# Altium footprint library 固定柱.PcbLib: 140 footprints (part 4 of 9)
Each footprint in its own frame and in the unit in brackets; x right, y up, seen from the top. Pads: shape width x height; smd on the part's side, far side on the other; paste and mask are expansions set on the pad; w line width, h text height; cw(c..) or ccw(c..) is an arc to the next point about the centre after c.
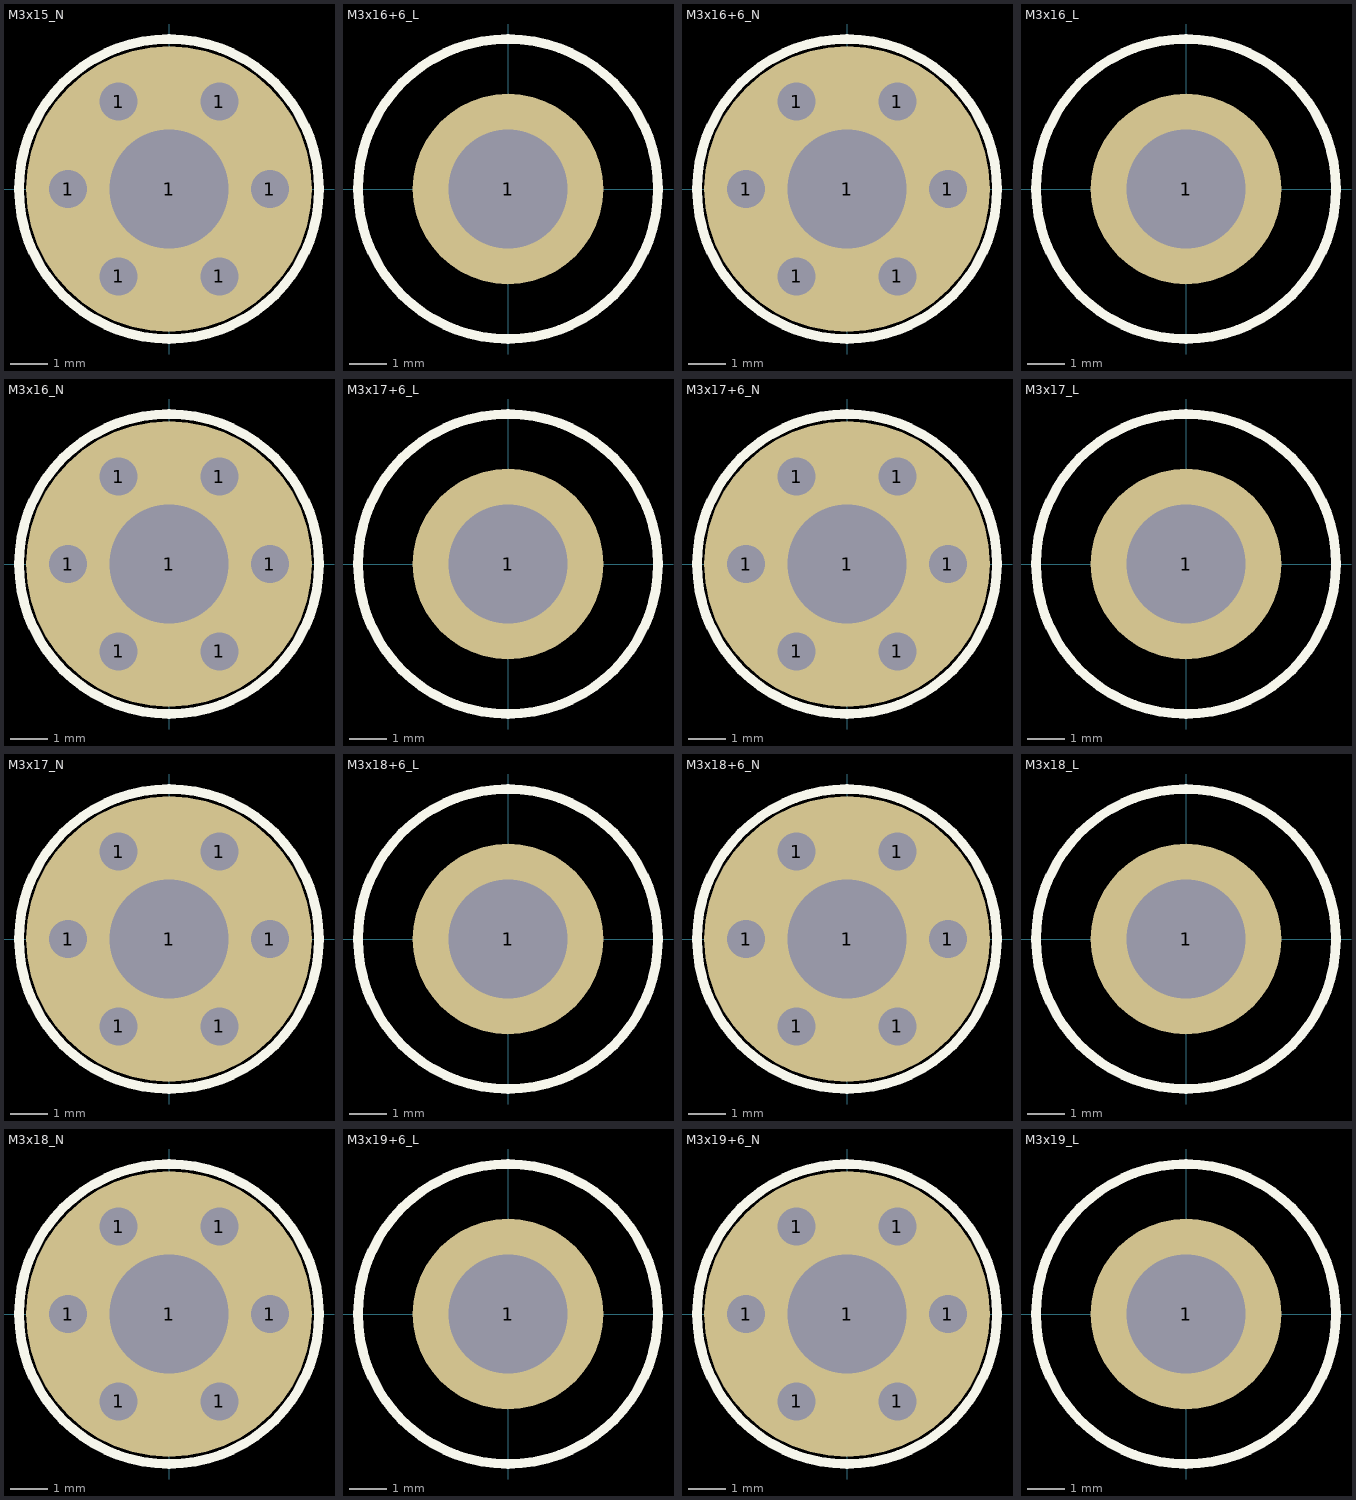
[diagram p3: the footprints below, top view; thin cyan lines are the x and y axes]

## M3x15_N [mil] "M3铜柱，长：15mm"
pads (7):
  round 40 hole 40: 1(-106,0) 1(-53,-91.8) 1(-53,91.8) 1(53,-91.8) 1(53,91.8) 1(106,0)
  round 300 hole 125: 1(0,0)
Top Overlay:
  circle w10: c0,0 r157.48
3D body "M3x15.STEP": height 592.53, standoff 1.96, extent -106.22,-92.52 106.22,92.52

## M3x16+6_L [mil] "M3铜柱，长：16mm，螺纹长：6mm"
pads (1):
  round 200 hole 125: 1(0,0)
Top Overlay:
  circle w10: c0,0 r157.48
3D body "M3x16+6.STEP": height 631.9, standoff -234.25, extent -106.22,-92.52 106.22,92.52

## M3x16+6_N [mil] "M3铜柱，长：16mm，螺纹长：6mm"
pads (7):
  round 40 hole 40: 1(-106,0) 1(-53,-91.8) 1(-53,91.8) 1(53,-91.8) 1(53,91.8) 1(106,0)
  round 300 hole 125: 1(0,0)
Top Overlay:
  circle w10: c0,0 r157.48
3D body "M3x16+6.STEP": height 631.9, standoff -234.25, extent -106.22,-92.52 106.22,92.52

## M3x16_L [mil] "M3铜柱，长：16mm"
pads (1):
  round 200 hole 125: 1(0,0)
Top Overlay:
  circle w10: c0,0 r157.48
3D body "M3x16.STEP": height 631.9, standoff 1.96, extent -106.22,-92.52 106.22,92.52

## M3x16_N [mil] "M3铜柱，长：16mm"
pads (7):
  round 40 hole 40: 1(-106,0) 1(-53,-91.8) 1(-53,91.8) 1(53,-91.8) 1(53,91.8) 1(106,0)
  round 300 hole 125: 1(0,0)
Top Overlay:
  circle w10: c0,0 r157.48
3D body "M3x16.STEP": height 631.9, standoff 1.96, extent -106.22,-92.52 106.22,92.52

## M3x17+6_L [mil] "M3铜柱，长：17mm，螺纹长：6mm"
pads (1):
  round 200 hole 125: 1(0,0)
Top Overlay:
  circle w10: c0,0 r157.48
3D body "M3x17+6.STEP": height 671.27, standoff -234.25, extent -106.22,-92.52 106.22,92.52

## M3x17+6_N [mil] "M3铜柱，长：17mm，螺纹长：6mm"
pads (7):
  round 40 hole 40: 1(-106,0) 1(-53,-91.8) 1(-53,91.8) 1(53,-91.8) 1(53,91.8) 1(106,0)
  round 300 hole 125: 1(0,0)
Top Overlay:
  circle w10: c0,0 r157.48
3D body "M3x17+6.STEP": height 671.27, standoff -234.25, extent -106.22,-92.52 106.22,92.52

## M3x17_L [mil] "M3铜柱，长：17mm"
pads (1):
  round 200 hole 125: 1(0,0)
Top Overlay:
  circle w10: c0,0 r157.48
3D body "M3x17.STEP": height 671.27, standoff 1.96, extent -106.22,-92.52 106.22,92.52

## M3x17_N [mil] "M3铜柱，长：17mm"
pads (7):
  round 40 hole 40: 1(-106,0) 1(-53,-91.8) 1(-53,91.8) 1(53,-91.8) 1(53,91.8) 1(106,0)
  round 300 hole 125: 1(0,0)
Top Overlay:
  circle w10: c0,0 r157.48
3D body "M3x17.STEP": height 671.27, standoff 1.96, extent -106.22,-92.52 106.22,92.52

## M3x18+6_L [mil] "M3铜柱，长：18mm，螺纹长：6mm"
pads (1):
  round 200 hole 125: 1(0,0)
Top Overlay:
  circle w10: c0,0 r157.48
3D body "M3x18+6.STEP": height 710.64, standoff -234.25, extent -106.22,-92.52 106.22,92.52

## M3x18+6_N [mil] "M3铜柱，长：18mm，螺纹长：6mm"
pads (7):
  round 40 hole 40: 1(-106,0) 1(-53,-91.8) 1(-53,91.8) 1(53,-91.8) 1(53,91.8) 1(106,0)
  round 300 hole 125: 1(0,0)
Top Overlay:
  circle w10: c0,0 r157.48
3D body "M3x18+6.STEP": height 710.64, standoff -234.25, extent -106.22,-92.52 106.22,92.52

## M3x18_L [mil] "M3铜柱，长：18mm"
pads (1):
  round 200 hole 125: 1(0,0)
Top Overlay:
  circle w10: c0,0 r157.48
3D body "M3x18.STEP": height 710.64, standoff 1.96, extent -106.22,-92.52 106.22,92.52

## M3x18_N [mil] "M3铜柱，长：18mm"
pads (7):
  round 40 hole 40: 1(-106,0) 1(-53,-91.8) 1(-53,91.8) 1(53,-91.8) 1(53,91.8) 1(106,0)
  round 300 hole 125: 1(0,0)
Top Overlay:
  circle w10: c0,0 r157.48
3D body "M3x18.STEP": height 710.64, standoff 1.96, extent -106.22,-92.52 106.22,92.52

## M3x19+6_L [mil] "M3铜柱，长：19mm，螺纹长：6mm"
pads (1):
  round 200 hole 125: 1(0,0)
Top Overlay:
  circle w10: c0,0 r157.48
3D body "M3x19+6.STEP": height 750.01, standoff -234.25, extent -106.22,-92.52 106.22,92.52

## M3x19+6_N [mil] "M3铜柱，长：19mm，螺纹长：6mm"
pads (7):
  round 40 hole 40: 1(-106,0) 1(-53,-91.8) 1(-53,91.8) 1(53,-91.8) 1(53,91.8) 1(106,0)
  round 300 hole 125: 1(0,0)
Top Overlay:
  circle w10: c0,0 r157.48
3D body "M3x19+6.STEP": height 750.01, standoff -234.25, extent -106.22,-92.52 106.22,92.52

## M3x19_L [mil] "M3铜柱，长：19mm"
pads (1):
  round 200 hole 125: 1(0,0)
Top Overlay:
  circle w10: c0,0 r157.48
3D body "M3x19.STEP": height 750.01, standoff 1.96, extent -106.22,-92.52 106.22,92.52